# Altium footprint library Gateway_Academic.PcbLib: 23 footprints (part 1 of 2)
Each footprint in its own frame and in the unit in brackets; x right, y up, seen from the top. Pads: shape width x height; smd on the part's side, far side on the other; paste and mask are expansions set on the pad; w line width, h text height; cw(c..) or ccw(c..) is an arc to the next point about the centre after c.
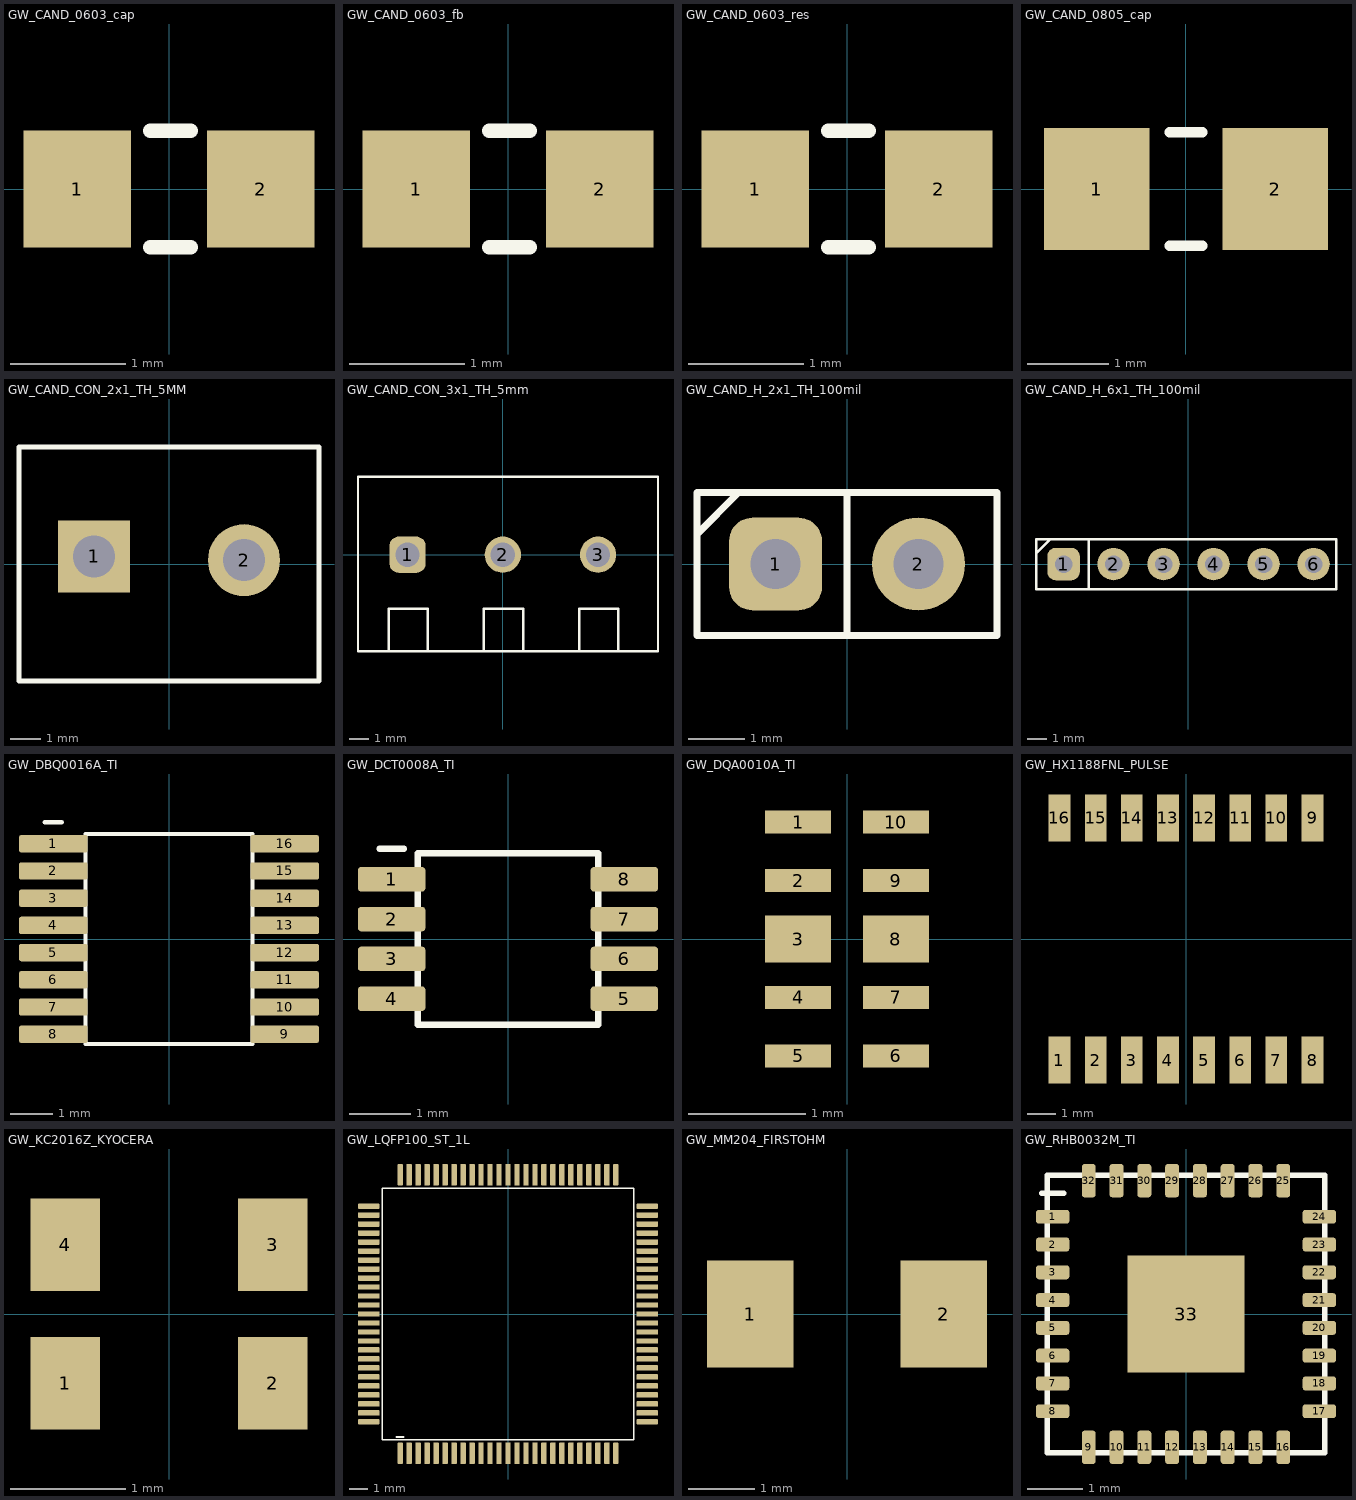
[diagram p0: the footprints below, top view; thin cyan lines are the x and y axes]

## GW_CAND_0603_cap [mil] "CAD_CANDIDATE; professor geometry inspected; exact MPN land/mask/paste unqualified."
pads (2):
  rect 37x40 smd: 1(-31.5,0) 2(31.5,0)
Top Overlay:
  lines w5: -6.5,-20 7.5,-20 ; -6.5,20 7.5,20
3D body "CircuitWorks-CAPACITOR 0603.STEP": height 34.36, standoff 0.5, extent -31.5,-16.93 31.5,16.93

## GW_CAND_0603_fb [mil] "CAD_CANDIDATE; professor geometry inspected; exact MPN land/mask/paste unqualified."
pads (2):
  rect 37x40 smd: 1(-31.5,0) 2(31.5,0)
Top Overlay:
  lines w5: -6.5,-20 7.5,-20 ; -6.5,20 7.5,20
3D body "742792602.stp": height 32, standoff 0.5, extent -31.5,-15.75 31.49,15.75

## GW_CAND_0603_res [mil] "CAD_CANDIDATE; professor geometry inspected; exact MPN land/mask/paste unqualified. 1608 Metric / 20190225 / C-A.Serna.A"
pads (2):
  rect 37x40 smd: 1(-31.5,0) 2(31.5,0)
Top Overlay:
  lines w5: -6.5,-20 7.5,-20 ; -6.5,20 7.5,20
3D body "C0603.step": height 11.89, standoff 0, extent -31.5,-15.75 31.5,15.75

## GW_CAND_0805_cap [mm] "CAD_CANDIDATE; professor geometry inspected; exact MPN land/mask/paste unqualified."
pads (2):
  rect 1.3x1.5 smd: 1(-1.1,0) 2(1.1,0)
Top Overlay:
  lines w0.127: -0.2,-0.7 0.2,-0.7 ; -0.2,0.7 0.2,0.7
3D body: height 1, standoff 0, extent -1.125,-0.7 1.075,0.7

## GW_CAND_CON_2x1_TH_5MM [mm] "CAD_CANDIDATE; professor geometry inspected; exact MPN land/mask/paste unqualified."
pads (2):
  rect 2.4x2.4 hole 1.4: 1(-2.5,0.254)
  round 2.4 hole 1.4: 2(2.5,0.127)
Top Overlay:
  lines w0.152: -5,-3.9 5,-3.9 5,3.9 -5,3.9 -5,-3.9
3D body: height 10.2, standoff 0, extent -5,-3.9 5,3.9

## GW_CAND_CON_3x1_TH_5mm [mm] "CAD_CANDIDATE; professor geometry inspected; exact MPN land/mask/paste unqualified."
pads (3):
  rrect50% 1.9x1.9 hole 1.27: 1(-5,0)
  round 1.9 hole 1.27: 2(0,0) 3(5,0)
Top Overlay:
  lines w0.127: -5.99,-5.08 -5.99,-2.83 -3.93,-2.83 -3.93,-5.08 ; -0.99,-5.08 -0.99,-2.83 1.07,-2.83 1.07,-5.077 ; 4.01,-5.08 4.01,-2.83 6.07,-2.83 6.07,-5.08 ; -7.603,-5.08 8.148,-5.08 8.148,4.102 -7.603,4.102 -7.603,-5.08
3D body "pxc_1935174_03_PT-1-5-3-5-0-H_3D.stp": height 11.7, standoff -3.2, extent -7.507,-4.988 8.063,4.012

## GW_CAND_H_2x1_TH_100mil [mil] "CAD_CANDIDATE; professor geometry inspected; exact MPN land/mask/paste unqualified."
pads (2):
  rrect50% 65x65 hole 35: 1(-50,0)
  round 65 hole 35: 2(50,0)
Top Overlay:
  lines w5: -105,20.87 -75.87,50 ; 0,-50 0,50 ; -105,-50 105,-50 105,50 -105,50 -105,-50
3D body "PH1-02-UA.STEP": height 338.58, standoff -116.14, extent -100.8,-49.16 99.48,49.26

## GW_CAND_H_6x1_TH_100mil [mil] "CAD_CANDIDATE; professor geometry inspected; exact MPN land/mask/paste unqualified."
pads (6):
  rrect50% 65x65 hole 35: 1(-250,0)
  round 65 hole 35: 2(-150,0) 3(-50,0) 4(50,0) 5(150,0) 6(250,0)
Top Overlay:
  lines w5: -305,20.87 -275.87,50 ; -200,-50 -200,50 ; -305,-50 -305,50 295,50 295,-50 -305,-50

## GW_DBQ0016A_TI [mil] "SLLSEY7G table4-2 p4; DBQ0016A 4214846/A PDF pp44-46;"
pads (16):
  rrect25% 63x16 smd paste+0 mask+2: 1(-106.3,87.5) 2(-106.3,62.5) 3(-106.3,37.5) 4(-106.3,12.5) 5(-106.3,-12.5) 6(-106.3,-37.5) 7(-106.3,-62.5) 8(-106.3,-87.5) 9(106.3,-87.5) 10(106.3,-62.5) 11(106.3,-37.5) 12(106.3,-12.5) 13(106.3,12.5) 14(106.3,37.5) 15(106.3,62.5) 16(106.3,87.5)
Top Overlay:
  lines w3.94: -114.17,107.31 -98.43,107.31 ; -76.77,-96.46 76.77,-96.46 76.77,96.46 -76.77,96.46 -76.77,-96.46
  text ".Designator" at 0,119.12 h39.37

## GW_DCT0008A_TI [mm] "SCES516N table4-1 p2; DCT0008A 4220784/D PDF pp28-30;"
pads (8):
  rrect25% 1.1x0.4 smd paste+0 mask+0.07: 1(-1.9,0.975) 2(-1.9,0.325) 3(-1.9,-0.325) 4(-1.9,-0.975) 5(1.9,-0.975) 6(1.9,-0.325) 7(1.9,0.325) 8(1.9,0.975)
Top Overlay:
  lines w0.1: -2.1,1.475 -1.7,1.475 ; -1.475,-1.4 1.475,-1.4 1.475,1.4 -1.475,1.4 -1.475,-1.4
  text ".Designator" at 0,1.775 h1

## GW_DQA0010A_TI [mm] "TI SLVSBO7O table4-2 p4; DQA0010A 4220328/A board/stencil pp29-30; 0.5mm pitch; pad3/8 .565x.4; others .565x.2; rectangular candidate replaces R.05 corners, pending stencil/DFM review."
pads (10):
  rect 0.565x0.2 smd: 1(-0.417,1) 2(-0.417,0.5) 4(-0.417,-0.5) 5(-0.417,-1) 6(0.417,-1) 7(0.417,-0.5) 9(0.417,0.5) 10(0.417,1)
  rect 0.565x0.4 smd: 3(-0.417,0) 8(0.417,0)

## GW_HX1188FNL_PULSE [mil] "Pulse HX1188FNL revB 30-May-2014 sheets2-3 PS-2005.002-D; 16 lands; 1.27mm pitch, .762x1.651mm; row centers +/-4.2545mm. No metal-under-transformer keepout encoded: board gate."
pads (16):
  rect 30x65 smd: 1(-175,-167.5) 2(-125,-167.5) 3(-75,-167.5) 4(-25,-167.5) 5(25,-167.5) 6(75,-167.5) 7(125,-167.5) 8(175,-167.5) 9(175,167.5) 10(125,167.5) 11(75,167.5) 12(25,167.5) 13(-25,167.5) 14(-75,167.5) 15(-125,167.5) 16(-175,167.5)

## GW_KC2016Z_KYOCERA [mm] "Kyocera TNY1T-H1-DEX01-11 17-Jul-2026 pp4,6 table2 fig4; Top view derived by mirroring numbered bottom view; 1=STANDBY,2=GND,3=OUT,4=VCC; no crystal load pads."
pads (4):
  rect 0.6x0.8 smd: 1(-0.9,-0.6) 2(0.9,-0.6) 3(0.9,0.6) 4(-0.9,0.6)

## GW_LQFP100_ST_1L [mm] "DS13313 Rev5 fig5, table7 pp57-71, fig65 p218 (PDF p219); Copper matches ST fig65; mask +0.05mm and 1:1 paste are explicit engineering choices, assembly/fab review pending, not manufacturer-qualified mask/stencil."
pads (100):
  rrect33% 0.3x1.2 smd paste+0 mask+0.05: 1(-6,-7.75) 2(-5.5,-7.75) 3(-5,-7.75) 4(-4.5,-7.75) 5(-4,-7.75) 6(-3.5,-7.75) 7(-3,-7.75) 8(-2.5,-7.75) 9(-2,-7.75) 10(-1.5,-7.75) 11(-1,-7.75) 12(-0.5,-7.75) 13(0,-7.75) 14(0.5,-7.75) 15(1,-7.75) 16(1.5,-7.75) 17(2,-7.75) 18(2.5,-7.75) 19(3,-7.75) 20(3.5,-7.75) 21(4,-7.75) 22(4.5,-7.75) 23(5,-7.75) 24(5.5,-7.75) 25(6,-7.75) 51(6,7.75) 52(5.5,7.75) 53(5,7.75) 54(4.5,7.75) 55(4,7.75) 56(3.5,7.75) 57(3,7.75) 58(2.5,7.75) 59(2,7.75) 60(1.5,7.75) 61(1,7.75) 62(0.5,7.75) 63(0,7.75) 64(-0.5,7.75) 65(-1,7.75) 66(-1.5,7.75) 67(-2,7.75) 68(-2.5,7.75) 69(-3,7.75) 70(-3.5,7.75) 71(-4,7.75) 72(-4.5,7.75) 73(-5,7.75) 74(-5.5,7.75) 75(-6,7.75)
  rrect33% 1.2x0.3 smd paste+0 mask+0.05: 26(7.75,-6) 27(7.75,-5.5) 28(7.75,-5) 29(7.75,-4.5) 30(7.75,-4) 31(7.75,-3.5) 32(7.75,-3) 33(7.75,-2.5) 34(7.75,-2) 35(7.75,-1.5) 36(7.75,-1) 37(7.75,-0.5) 38(7.75,0) 39(7.75,0.5) 40(7.75,1) 41(7.75,1.5) 42(7.75,2) 43(7.75,2.5) 44(7.75,3) 45(7.75,3.5) 46(7.75,4) 47(7.75,4.5) 48(7.75,5) 49(7.75,5.5) 50(7.75,6) 76(-7.75,6) 77(-7.75,5.5) 78(-7.75,5) 79(-7.75,4.5) 80(-7.75,4) 81(-7.75,3.5) 82(-7.75,3) 83(-7.75,2.5) 84(-7.75,2) 85(-7.75,1.5) 86(-7.75,1) 87(-7.75,0.5) 88(-7.75,0) 89(-7.75,-0.5) 90(-7.75,-1) 91(-7.75,-1.5) 92(-7.75,-2) 93(-7.75,-2.5) 94(-7.75,-3) 95(-7.75,-3.5) 96(-7.75,-4) 97(-7.75,-4.5) 98(-7.75,-5) 99(-7.75,-5.5) 100(-7.75,-6)
Top Overlay:
  lines w0.1: -6.2,-6.85 -5.8,-6.85 ; -7,-7 7,-7 7,7 -7,7 -7,-7
  text ".Designator" at 0,8.95 h1

## GW_MM204_FIRSTOHM [mm] "Firstohm MM rev08-March-2023 printedpp75-78; p78 reflow pad table MM16/MM204; Reflow minimum lands1.3x1.6, inner spacing1.6mm; nonpolar numbering project1/2. Pulse qualification separate."
pads (2):
  rect 1.3x1.6 smd: 1(-1.45,0) 2(1.45,0)

## GW_RHB0032M_TI [mm] "SNLS647I table5-1 pp5-6; exposed pad p7; RHB0032M 4223725/A PDF pp111-113; EP33 paste suppressed; four .94mm square paste windows at +/- .57mm (TI 80% example). No automatic thermal-via drill holes."
pads (33):
  rrect40% 0.6x0.25 smd paste+0 mask+0.05: 1(-2.4,1.75) 2(-2.4,1.25) 3(-2.4,0.75) 4(-2.4,0.25) 5(-2.4,-0.25) 6(-2.4,-0.75) 7(-2.4,-1.25) 8(-2.4,-1.75) 17(2.4,-1.75) 18(2.4,-1.25) 19(2.4,-0.75) 20(2.4,-0.25) 21(2.4,0.25) 22(2.4,0.75) 23(2.4,1.25) 24(2.4,1.75)
  rrect40% 0.25x0.6 smd paste+0 mask+0.05: 9(-1.75,-2.4) 10(-1.25,-2.4) 11(-0.75,-2.4) 12(-0.25,-2.4) 13(0.25,-2.4) 14(0.75,-2.4) 15(1.25,-2.4) 16(1.75,-2.4) 25(1.75,2.4) 26(1.25,2.4) 27(0.75,2.4) 28(0.25,2.4) 29(-0.25,2.4) 30(-0.75,2.4) 31(-1.25,2.4) 32(-1.75,2.4)
  rect 2.1x2.1 smd paste-1.05 mask+0.05: 33(0,0)
Top Layer:
  rectangle: -1.04,-1.04 -0.1,-0.1
  rectangle: -1.04,0.1 -0.1,1.04
  rectangle: 0.1,-1.04 1.04,-0.1
  rectangle: 0.1,0.1 1.04,1.04
Top Overlay:
  lines w0.1: -2.6,2.175 -2.2,2.175 ; -2.5,-2.5 2.5,-2.5 2.5,2.5 -2.5,2.5 -2.5,-2.5
  text ".Designator" at 0,3.3 h1